# Altium footprint library 796739-2.PcbLib: 1 footprints
Each footprint in its own frame and in the unit in brackets; x right, y up, seen from the top. Pads: shape width x height; smd on the part's side, far side on the other; paste and mask are expansions set on the pad; w line width, h text height; cw(c..) or ccw(c..) is an arc to the next point about the centre after c.
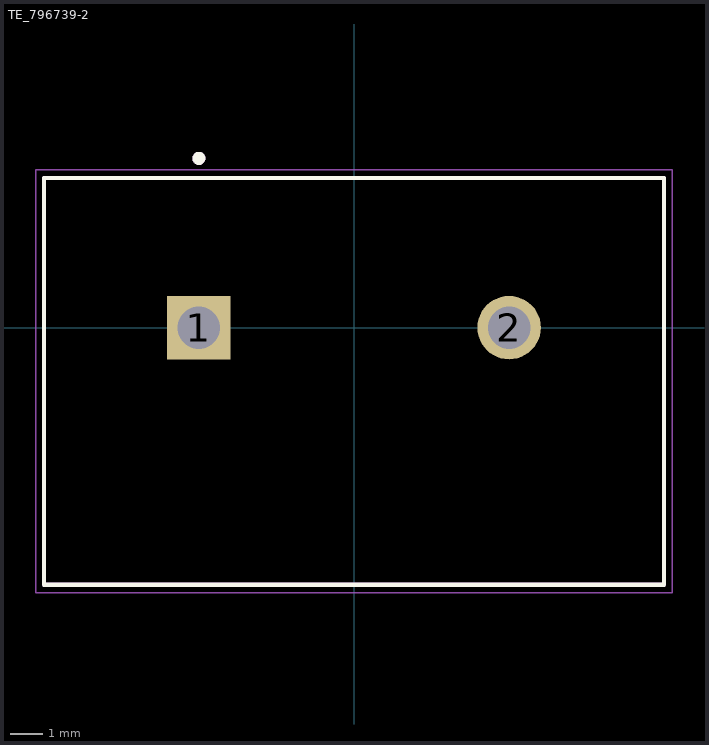
[diagram p0: the footprint, top view; thin cyan lines are the x and y axes]

## TE_796739-2 [mm]
pads (2):
  rect 1.95x1.95 / inner round 1.95 / far side rect 1.95x1.95 hole 1.3: 1(-4.765,0)
  round 1.95 hole 1.3: 2(4.765,0)
Top Overlay:
  circle w0.2: c-4.765,5.2 r0.1
  lines w0.127: -9.525,-7.9 9.525,-7.9 9.525,4.6 -9.525,4.6 -9.525,-7.9
Assembly Top:
  circle w0.2: c-4.765,5.2 r0.1
  lines w0.127: -9.525,-7.9 9.525,-7.9 9.525,4.6 -9.525,4.6 -9.525,-7.9
Courtyard Top:
  lines w0.05: -9.775,-8.15 9.775,-8.15 9.775,4.85 -9.775,4.85 -9.775,-8.15
3D body "step_temp.STEP": height 14.65, standoff -11.85, extent -9.52,0 10.12,12.5